# Altium footprint library Electrode_35x25_4x5_D2.PcbLib: 8 footprints
Each footprint in its own frame and in the unit in brackets; x right, y up, seen from the top. Pads: shape width x height; smd on the part's side, far side on the other; paste and mask are expansions set on the pad; w line width, h text height; cw(c..) or ccw(c..) is an arc to the next point about the centre after c.
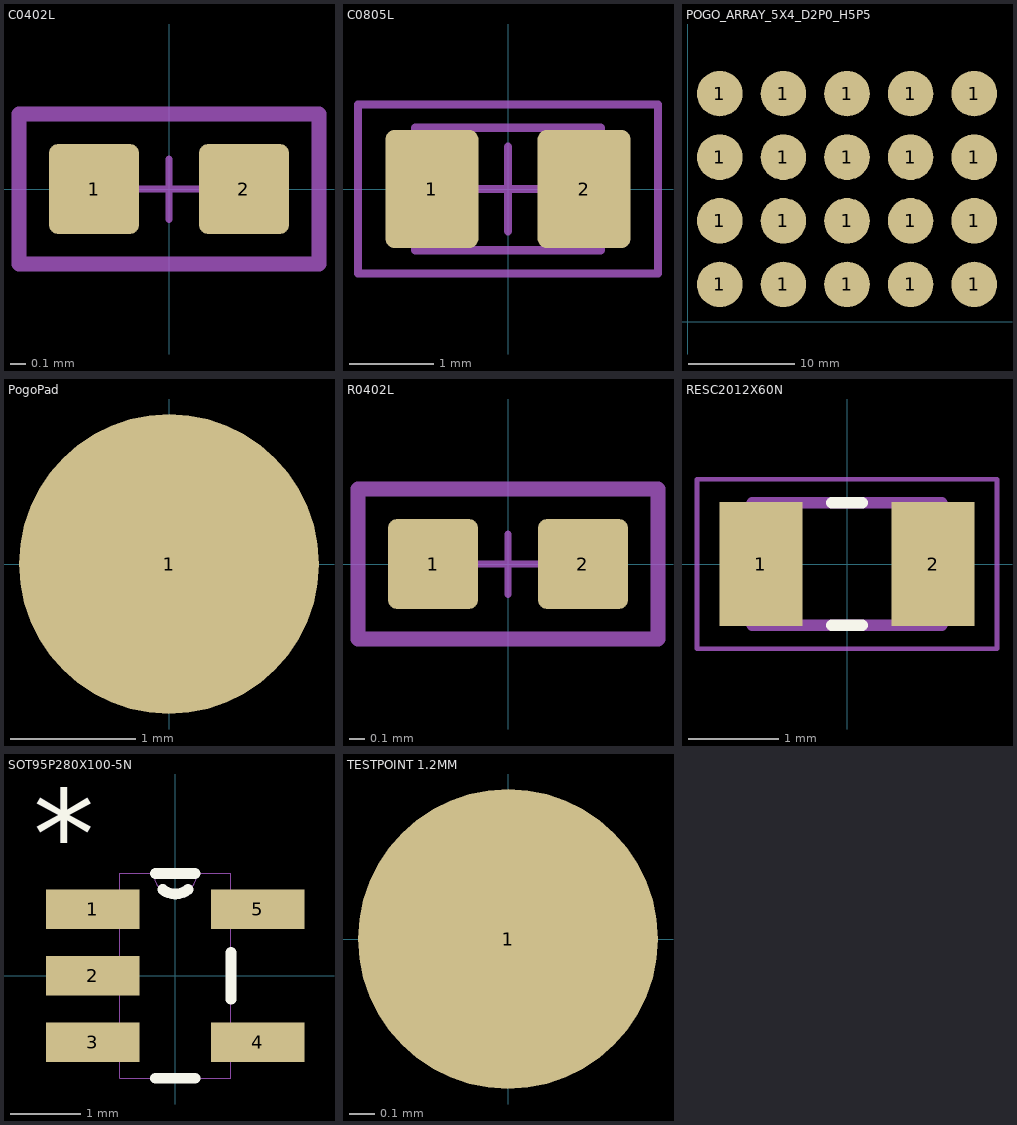
[diagram p0: the footprints below, top view; thin cyan lines are the x and y axes]

## C0402L [mm]
height 0.7
pads (2):
  rrect20% 0.6x0.6 smd paste+0.05 mask+0.05: 1(-0.5,0) 2(0.5,0)
Mechanical 5:
  lines w0.1: -1,-0.5 -1,0.5 1,0.5 1,-0.5 -1,-0.5
  text ".Designator" at -0.725,-0.225 h0.7
Mechanical 15:
  lines w0.05: -0.2,0 0.2,0 ; 0,-0.2 0,0.2 ; -1,-0.5 -1,0.5 1,0.5 1,-0.5 -1,-0.5
3D body "User Library-Capacitor 0402.step": height 0.49, standoff -0.01, extent -0.5,-0.25 0.5,0.25

## C0805L [mm]
height 0.7
pads (2):
  rrect20% 1.1x1.4 smd mask+0.05: 1(-0.9,0) 2(0.9,0)
Mechanical 5:
  lines w0.1: -1.775,-1 1.775,-1 1.775,1 -1.775,1 -1.775,-1
  text ".Designator" at -1.357,-0.413 h1.32
Mechanical 13:
  lines w0.1: -0.65,-0.725 -0.65,0.725 ; 0.65,-0.725 0.65,0.725 ; -1.1,-0.725 1.1,-0.725 1.1,0.725 -1.1,0.725 -1.1,-0.725
Mechanical 15:
  lines w0.1: -0.5,0 0.5,0 ; 0,-0.5 0,0.5 ; -1.775,-1 1.775,-1 1.775,1 -1.775,1 -1.775,-1
3D body: height 1.1, standoff 0, extent -1.099,-0.724 -0.651,0.724
3D body: height 1.1, standoff 0, extent -0.649,-0.724 0.649,0.724
3D body: height 1.1, standoff 0, extent 0.651,-0.724 1.099,0.724

## POGO_ARRAY_5X4_D2P0_H5P5 [mm]
pads (20):
  round 4.3 smd paste-2539.97: 1(3,3.5) 1(3,9.5) 1(3,15.5) 1(3,21.5) 1(9,3.5) 1(9,9.5) 1(9,15.5) 1(9,21.5) 1(15,3.5) 1(15,9.5) 1(15,15.5) 1(15,21.5) 1(21,3.5) 1(21,9.5) 1(21,15.5) 1(21,21.5) 1(27,3.5) 1(27,9.5) 1(27,15.5) 1(27,21.5)
3D body "pogo_pin_5.5mm.step": height 5.5, standoff 0, extent 2.107,8.3 4.093,10.3
3D body "pogo_pin_5.5mm.step": height 5.5, standoff 0, extent 2.1,20.7 4.085,22.7
3D body "pogo_pin_5.5mm.step": height 5.5, standoff 0, extent 8.007,20.5 9.993,22.5
3D body "pogo_pin_5.5mm.step": height 5.5, standoff 0, extent 14.007,20.5 15.993,22.5
3D body "pogo_pin_5.5mm.step": height 5.5, standoff 0, extent 26.007,20.5 27.993,22.5
3D body "pogo_pin_5.5mm.step": height 5.5, standoff 0, extent 2,14.5 3.985,16.5
3D body "pogo_pin_5.5mm.step": height 5.5, standoff 0, extent 26.007,14.5 27.993,16.5
3D body "pogo_pin_5.5mm.step": height 5.5, standoff 0, extent 26.007,8.5 27.993,10.5
3D body "pogo_pin_5.5mm.step": height 5.5, standoff 0, extent 26.207,2.4 28.193,4.4
3D body "pogo_pin_5.5mm.step": height 5.5, standoff 0, extent 20.007,20.5 21.993,22.5
3D body "pogo_pin_5.5mm.step": height 5.5, standoff 0, extent 20.007,14.5 21.993,16.5
3D body "pogo_pin_5.5mm.step": height 5.5, standoff 0, extent 20.007,8.5 21.993,10.5
3D body "pogo_pin_5.5mm.step": height 5.5, standoff 0, extent 20.007,2.5 21.993,4.5
3D body "pogo_pin_5.5mm.step": height 5.5, standoff 0, extent 14.007,14.5 15.993,16.5
3D body "pogo_pin_5.5mm.step": height 5.5, standoff 0, extent 14.007,8.5 15.993,10.5
3D body "pogo_pin_5.5mm.step": height 5.5, standoff 0, extent 14.107,2.2 16.093,4.2
3D body "pogo_pin_5.5mm.step": height 5.5, standoff 0, extent 8.007,14.5 9.993,16.5
3D body "pogo_pin_5.5mm.step": height 5.5, standoff 0, extent 8.007,8.5 9.993,10.5
3D body "pogo_pin_5.5mm.step": height 5.5, standoff 0, extent 8.007,2.3 9.993,4.3
3D body "pogo_pin_5.5mm.step": height 5.5, standoff 0, extent 2.007,2.3 3.993,4.3

## PogoPad [mm]
pads (1):
  round 2.4 smd paste-2539.97: 1(0,0)
3D body "pogo_pin_5.5mm.step": height 5.5, standoff 0, extent -1,-0.993 1,0.993

## R0402L [mm]
height 8.382
pads (2):
  rrect20% 0.6x0.6 smd paste+0.05 mask+0.05: 1(-0.5,0) 2(0.5,0)
Mechanical 5:
  lines w0.1: -1,-0.5 -1,0.5 1,0.5 1,-0.5 -1,-0.5
  text ".Designator" at -0.725,-0.225 h0.7
Mechanical 15:
  lines w0.05: -0.2,0 0.2,0 ; 0,-0.2 0,0.2 ; -1,-0.5 -1,0.5 1,0.5 1,-0.5 -1,-0.5
3D body "User Library-0402(1005M) Res.step": height 0.51, standoff 0, extent -0.508,-0.254 0.508,0.254

## RESC2012X60N [mm]
pads (2):
  rect 0.92x1.38 smd paste+0 mask+0.102: 1(-0.955,0) 2(0.955,0)
Top Overlay:
  lines w0.127: -0.17,-0.68 0.17,-0.68 ; -0.17,0.68 0.17,0.68
Mechanical 13:
  lines w0.127: -1.05,-0.68 1.05,-0.68 1.05,0.68 -1.05,0.68 -1.05,-0.68
Mechanical 15:
  lines w0.05: -1.665,-0.94 1.665,-0.94 1.665,0.94 -1.665,0.94 -1.665,-0.94
3D body "step_temp.STEP": height 0.6, standoff 0, extent -1,-0.625 1,0.625

## SOT95P280X100-5N [mil]
pads (5):
  rect 52x22 smd: 1(-46,37) 2(-46,0) 3(-46,-37) 4(46,-37) 5(46,37)
Top Overlay:
  lines w6: -11,-57 11,-57 ; -11,57 11,57 ; -7,48 ccw(c0,56.96) 7,48 ; 31,-13 31,13
  text "*" at -79,54 h50
Mechanical 13:
  lines w0: -31,-47 -31,-57 31,-57 31,-47 ; -31,-47 -31,-28 ; -31,-47 -55,-47 -55,-28 -31,-28 ; -31,-28 -31,-10 ; -31,-10 -31,10 ; -31,-10 -55,-10 -55,10 -31,10 ; -31,10 -31,28 ; -31,28 -31,47 ; -31,28 -55,28 -55,47 -31,47 ; -31,47 -31,57 -12,57 ; -12,57 ccw(c0,57) 12,57 ; -12,57 12,57 ; 12,57 31,57 31,47 ; 31,-47 31,-28 ; 31,-47 55,-47 55,-28 31,-28 ; 31,-28 31,28 ; 31,28 31,47 ; 31,28 55,28 55,47 31,47
  text "*" at -79,54 h50
3D body "AD8603AUJZ.STEP": height 38.78, standoff -0.59, extent -55.12,-59.17 55.12,55

## TESTPOINT 1.2MM [mm]
height 0.7
pads (1):
  round 1.2 smd paste-1 mask+0.1: 1(0,0)